# Altium footprint library PTUMotorDriver.PcbLib: 51 footprints (part 1 of 4)
Each footprint in its own frame and in the unit in brackets; x right, y up, seen from the top. Pads: shape width x height; smd on the part's side, far side on the other; paste and mask are expansions set on the pad; w line width, h text height; cw(c..) or ccw(c..) is an arc to the next point about the centre after c.
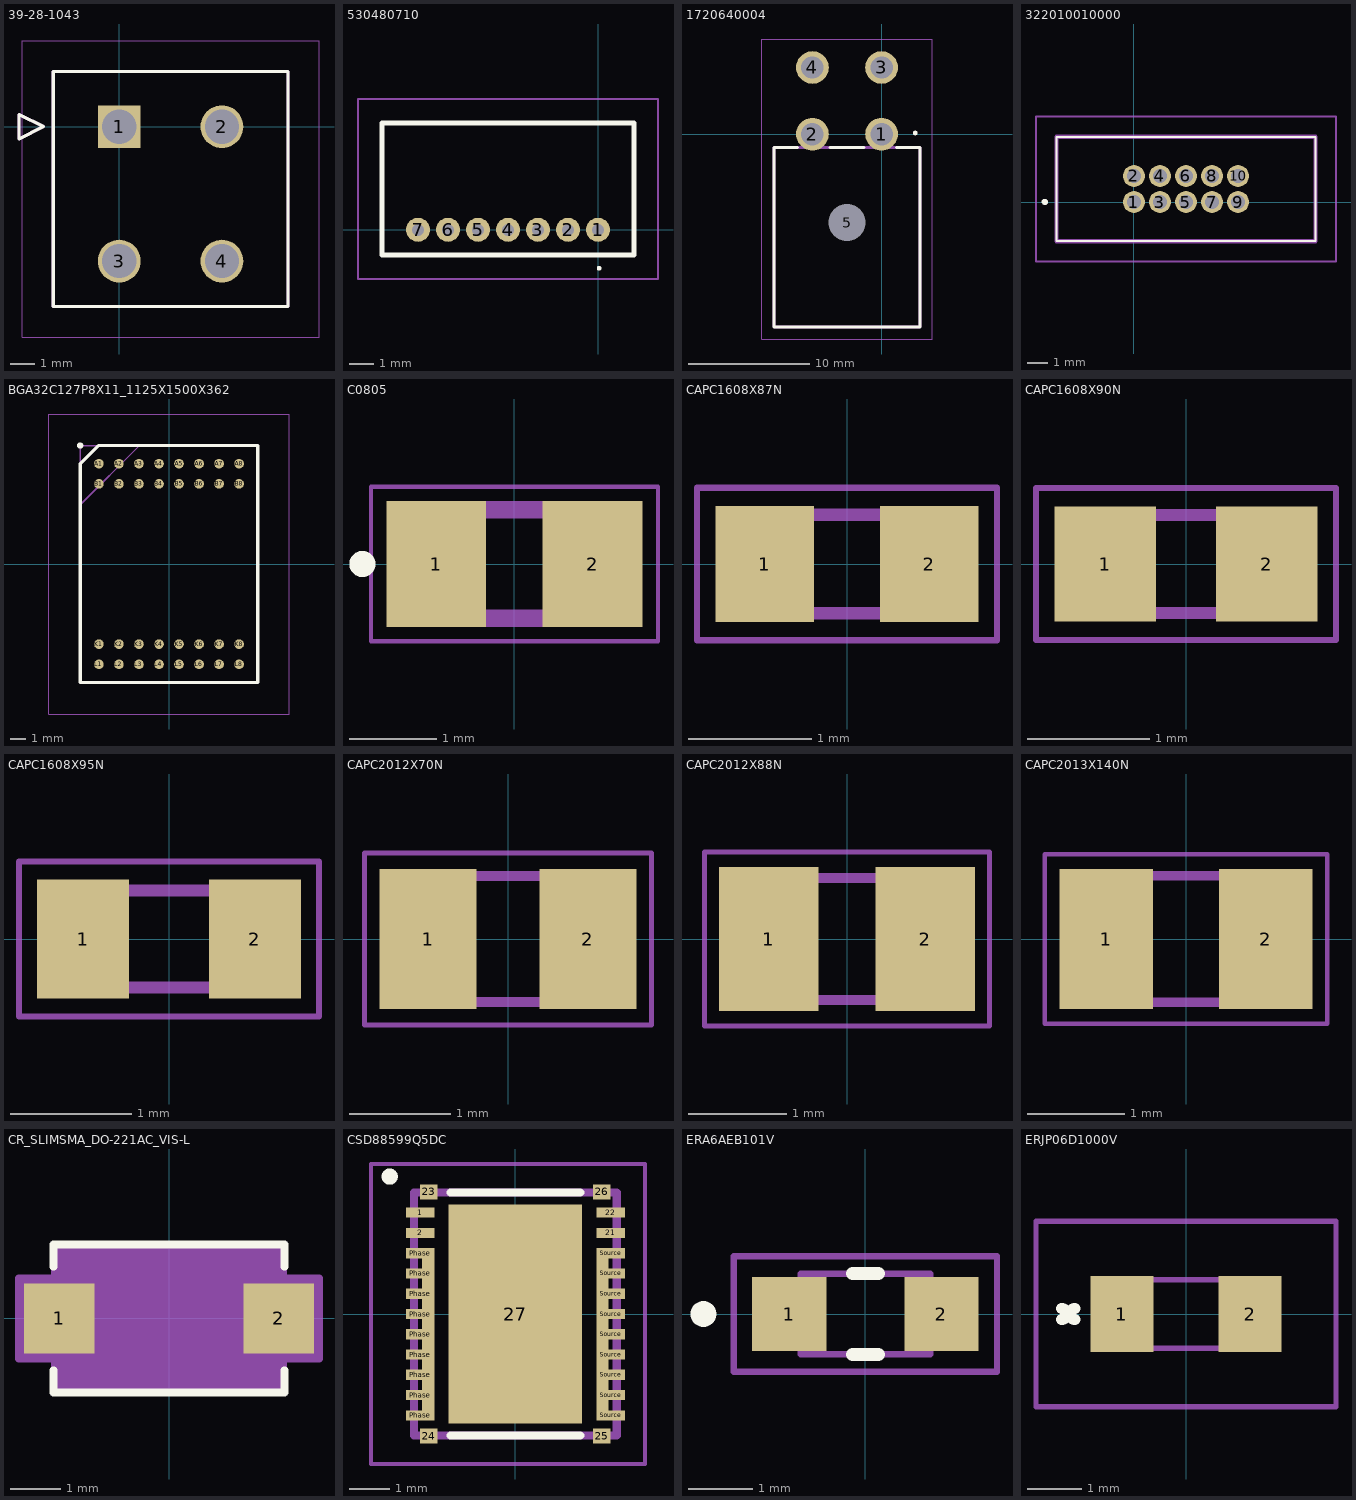
[diagram p0: the footprints below, top view; thin cyan lines are the x and y axes]

## 39-28-1043 [mm]
pads (4):
  rect 1.75x1.75 hole 1.4: 1(0,0)
  round 1.75 hole 1.4: 2(4.2,0) 3(0,-5.5) 4(4.2,-5.5)
Top Overlay:
  lines w0.127: -4.1,-0.5 -4.1,0.5 -3.1,0 -4.1,-0.5 ; -2.7,-7.35 6.9,-7.35 6.9,2.25 -2.7,2.25 -2.7,-7.35
Top 3D Body:
  lines w0.127: -4.1,-0.5 -4.1,0.5 -3.1,0 -4.1,-0.5 ; -2.7,-7.35 6.9,-7.35 6.9,2.25 -2.7,2.25 -2.7,-7.35
Top Courtyard:
  lines w0.05: -3.97,-8.62 8.17,-8.62 8.17,3.52 -3.97,3.52 -3.97,-8.62
3D body "39-28-1043.stp": height 12.76, standoff -3.54, extent -3.107,-8.74 7.29,2.26

## 530480710 [mm]
pads (7):
  round 1 hole 0.5: 1(0,0) 2(-1.25,0) 3(-2.5,0) 4(-3.75,0) 5(-5,0) 6(-6.25,0) 7(-7.5,0)
Top Overlay:
  lines w0.1: 0,-1.6 ccw(c0.05,-1.6) 0.1,-1.6 ccw(c0.05,-1.6) 0,-1.6
  lines w0.2: -9,-1.05 1.5,-1.05 1.5,4.45 -9,4.45 -9,-1.05
Top 3D Body:
  lines w0.1: -9,-1.05 1.5,-1.05 1.5,4.45 -9,4.45 -9,-1.05
Top Courtyard:
  lines w0.1: -10,-2.05 2.5,-2.05 2.5,5.45 -10,5.45 -10,-2.05
3D body "53048-0710.stp": height 3.4, standoff -2.4, extent -9,-1.045 1.5,4.455

## 1720640004 [mm]
pads (5):
  round 2.7 hole 1.85: 1(0,0) 2(-5.7,0) 3(0,5.5) 4(-5.7,5.5)
  round 1.525 hole 3.05 unplated: 5(-2.85,-7.3)
Top Overlay:
  lines w0.188: 2.86,0.042 cw(c2.782,0.095) 2.688,0.095 cw(c2.782,0.095) 2.876,0.095
  lines w0.254: -6.952,-1.1 -8.875,-1.1 -8.875,-15.9 3.175,-15.9 3.175,-1.1 1.252,-1.1 ; -4.25,-1.1 -1.45,-1.1
Top 3D Body:
  lines w0.254: -8.875,-15.9 -8.875,-1.1 3.175,-1.1 3.175,-15.9 -8.875,-15.9
Top Courtyard:
  lines w0.1: -9.875,-16.9 -9.875,7.85 4.175,7.85 4.175,-16.9 -9.875,-16.9
3D body "172064-0004.stp": height 14.5, standoff -3.64, extent -8.884,-15.887 3.176,6.075

## 322010010000 [mm]
pads (10):
  round 1.07 hole 0.7: 1(0,0) 2(0,1.27) 3(1.27,0) 4(1.27,1.27) 5(2.54,0) 6(2.54,1.27) 7(3.81,0) 8(3.81,1.27) 9(5.08,0) 10(5.08,1.27)
Top Overlay:
  lines w0.1: -3.785,-1.915 8.865,-1.915 8.865,3.185 -3.785,3.185 -3.785,-1.915
  lines w0.2: -4.418,0 cw(c-4.368,0) -4.318,0 ; -4.4,0 cw(c-4.35,0) -4.3,0 cw(c-4.35,0) -4.4,0
Top 3D Body:
  lines w0.2: -3.785,-1.915 8.865,-1.915 8.865,3.185 -3.785,3.185 -3.785,-1.915
Top Courtyard:
  lines w0.1: -4.785,-2.915 9.865,-2.915 9.865,4.185 -4.785,4.185 -4.785,-2.915
3D body "3220-10-0100-00.stp": height 5.63, standoff -1.92, extent -3.866,-1.99 8.946,3.254

## BGA32C127P8X11_1125X1500X362 [mm]
pads (32):
  round 0.612 smd: A1(-4.445,6.35) A2(-3.175,6.35) A3(-1.905,6.35) A4(-0.635,6.35) A5(0.635,6.35) A6(1.905,6.35) A7(3.175,6.35) A8(4.445,6.35) B1(-4.445,5.08) B2(-3.175,5.08) B3(-1.905,5.08) B4(-0.635,5.08) B5(0.635,5.08) B6(1.905,5.08) B7(3.175,5.08) B8(4.445,5.08) K1(-4.445,-5.08) K2(-3.175,-5.08) K3(-1.905,-5.08) K4(-0.635,-5.08) K5(0.635,-5.08) K6(1.905,-5.08) K7(3.175,-5.08) K8(4.445,-5.08) L1(-4.445,-6.35) L2(-3.175,-6.35) L3(-1.905,-6.35) L4(-0.635,-6.35) L5(0.635,-6.35) L6(1.905,-6.35) L7(3.175,-6.35) L8(4.445,-6.35)
Top Overlay:
  circle w0.2: c-5.625,7.5 r0.1
  lines w0.2: -5.625,-7.5 -5.625,6.35 -4.475,7.5 5.625,7.5 5.625,-7.5 -5.625,-7.5
Top 3D Body:
  lines w0.1: -5.625,3.75 -1.875,7.5 ; -5.625,-7.5 -5.625,7.5 5.625,7.5 5.625,-7.5 -5.625,-7.5
Top Courtyard:
  lines w0.05: -7.625,-9.5 -7.625,9.5 7.625,9.5 7.625,-9.5 -7.625,-9.5
3D body "LTM2889HY-3#PBF.stp": height 3.62, standoff 0, extent -5.625,-7.5 5.625,7.5

## C0805 [mm]
pads (2):
  rect 1.15x1.45 smd: 1(-0.9,0) 2(0.9,0)
Top Overlay:
  circle w0.2: c-1.75,0 r0.05
Top 3D Body:
  lines w0.2: -1,-0.625 -1,0.625 1,0.625 1,-0.625 -1,-0.625
Top Courtyard:
  lines w0.05: -1.651,-0.889 -1.651,0.889 1.651,0.889 1.651,-0.889 -1.651,-0.889
3D body "C0805C103K5RACTU.stp": height 0.98, standoff 0, extent -1.15,-0.78 1.15,0.77

## CAPC1608X87N [mm]
pads (2):
  rect 0.8x0.94 smd: 1(-0.67,0) 2(0.67,0)
Top 3D Body:
  lines w0.1: -0.8,-0.4 0.8,-0.4 0.8,0.4 -0.8,0.4 -0.8,-0.4
Top Courtyard:
  lines w0.05: -1.22,-0.62 1.22,-0.62 1.22,0.62 -1.22,0.62 -1.22,-0.62
3D body "0603B221K500CT.stp": height 0.87, standoff 0, extent -0.8,-0.4 0.8,0.4

## CAPC1608X90N [mm]
pads (2):
  rect 0.83x0.94 smd: 1(-0.66,0) 2(0.66,0)
Top 3D Body:
  lines w0.1: -0.8,-0.4 0.8,-0.4 0.8,0.4 -0.8,0.4 -0.8,-0.4
Top Courtyard:
  lines w0.05: -1.225,-0.62 1.225,-0.62 1.225,0.62 -1.225,0.62 -1.225,-0.62
3D body "CC0603KRX7R7BB104.stp": height 0.8, standoff 0, extent -0.803,-0.399 0.797,0.401

## CAPC1608X95N [mm]
pads (2):
  rect 0.76x0.98 smd: 1(-0.71,0) 2(0.71,0)
Top 3D Body:
  lines w0.1: -0.8,-0.4 0.8,-0.4 0.8,0.4 -0.8,0.4 -0.8,-0.4
Top Courtyard:
  lines w0.05: -1.24,-0.64 1.24,-0.64 1.24,0.64 -1.24,0.64 -1.24,-0.64
3D body "CL10B475KQ8NQNC.stp": height 0.95, standoff 0, extent -0.8,-0.4 0.8,0.4

## CAPC2012X70N [mm]
pads (2):
  rect 0.96x1.39 smd: 1(-0.79,0) 2(0.79,0)
Top 3D Body:
  lines w0.1: -1,-0.625 1,-0.625 1,0.625 -1,0.625 -1,-0.625
Top Courtyard:
  lines w0.05: -1.42,-0.85 1.42,-0.85 1.42,0.85 -1.42,0.85 -1.42,-0.85
3D body "CC0805BRNPO9BNR47.stp": height 0.7, standoff 0, extent -1,-0.625 1,0.625

## CAPC2012X88N [mm]
pads (2):
  rect 1.02x1.47 smd: 1(-0.8,0) 2(0.8,0)
Top 3D Body:
  lines w0.1: -1,-0.625 -1,0.625 1,0.625 1,-0.625 -1,-0.625
Top Courtyard:
  lines w0.05: -1.46,-0.89 -1.46,0.89 1.46,0.89 1.46,-0.89 -1.46,-0.89
3D body "C0805C102J5GAC-TU.stp": height 0.88, standoff 0, extent -1.1,-0.72 1.1,0.73

## CAPC2013X140N [mm]
pads (2):
  rect 0.96x1.44 smd: 1(-0.82,0) 2(0.82,0)
Top 3D Body:
  lines w0.1: -1.025,-0.65 1.025,-0.65 1.025,0.65 -1.025,0.65 -1.025,-0.65
Top Courtyard:
  lines w0.05: -1.45,-0.87 1.45,-0.87 1.45,0.87 -1.45,0.87 -1.45,-0.87
3D body "LMK212AB7106MG-T.stp": height 1.4, standoff 0, extent -1.025,-0.65 1.025,0.65

## CR_SLIMSMA_DO-221AC_VIS-L [mil]
pads (2):
  rect 55x55 smd paste+0 mask+0: 1(-86,0) 2(86,0)
Top Overlay:
  lines w6: -90.5,-40.6 -90.5,-58 90.5,-58 90.5,-40.6 ; -90.5,40.6 -90.5,58 90.5,58 90.5,40.6
Top 3D Body:
  circle w0: c-58.5,0 r3
  lines w0: -12,53 ccw(c0,53) 12,53
  lines w1: -85.5,-53 85.5,-53 85.5,53 -85.5,53 -85.5,-53
Top Courtyard:
  region: -89.5,-31.5 -117.5,-31.5 -117.5,31.5 -89.5,31.5 -89.5,57 89.5,57 89.5,31.5 117.5,31.5 117.5,-31.5 89.5,-31.5 89.5,-57 -89.5,-57
  lines w6: -117.5,-31.5 -117.5,31.5 -89.5,31.5 -89.5,57 89.5,57 89.5,31.5 117.5,31.5 117.5,-31.5 89.5,-31.5 89.5,-57 -89.5,-57 -89.5,-31.5 -117.5,-31.5
3D body "CR_SLIMSMA_DO-221AC_VIS.step": height 39.09, standoff 0, extent -105.51,-52.99 105.51,52.99

## CSD88599Q5DC [mm]
pads (43):
  rect 0.7x0.25 smd: 1(-2.35,2.5) 2(-2.35,2) 21(2.35,2) 22(2.35,2.5) Phase(-2.35,-2.5) Phase(-2.35,-2) Phase(-2.35,-1.5) Phase(-2.35,-1) Phase(-2.35,-0.5) Phase(-2.35,0) Phase(-2.35,0.5) Phase(-2.35,1) Phase(-2.35,1.5) Source(2.35,-2.5) Source(2.35,-2) Source(2.35,-1.5) Source(2.35,-1) Source(2.35,-0.5) Source(2.35,0) Source(2.35,0.5) Source(2.35,1) Source(2.35,1.5)
  rect 0.43x0.375 smd: 23(-2.135,3.013) 24(-2.135,-3.013) 25(2.135,-3.013) 26(2.135,3.013)
  rect 3.3x5.4 smd: 27(0,0)
  rect 0.3x0.25 smd: Phase(-2.15,-2.25) Phase(-2.15,-1.75) Phase(-2.15,-1.25) Phase(-2.15,-0.75) Phase(-2.15,-0.25) Phase(-2.15,0.25) Phase(-2.15,0.75) Phase(-2.15,1.25) Source(2.15,-2.25) Source(2.15,-1.75) Source(2.15,-1.25) Source(2.15,-0.75) Source(2.15,-0.25) Source(2.15,0.25) Source(2.15,0.75) Source(2.15,1.25)
Top Overlay:
  lines w0.2: -1.6,-3 1.6,-3 ; -1.6,3 1.6,3 ; -3.2,3.389 ccw(c-3.1,3.389) -3,3.389 ccw(c-3.1,3.389) -3.2,3.389
Top 3D Body:
  lines w0.2: -2.5,-3 -2.5,3 2.5,3 2.5,-3 -2.5,-3
Top Courtyard:
  lines w0.1: -3.563,-3.7 -3.563,3.7 3.2,3.7 3.2,-3.7 -3.563,-3.7
3D body "CSD88599Q5DC.stp": height 1.05, standoff 0, extent -2.5,-3 2.5,3

## ERA6AEB101V [mm]
pads (2):
  rect 1.15x1.15 smd: 1(-1.175,0) 2(1.175,0)
Top Overlay:
  lines w0.2: -0.2,-0.625 0.2,-0.625 ; -0.2,0.625 0.2,0.625 ; -2.5,-0.1 ccw(c-2.5,0) -2.5,0.1 ccw(c-2.5,0) -2.5,-0.1
Top 3D Body:
  lines w0.1: -1,-0.625 -1,0.625 1,0.625 1,-0.625 -1,-0.625
Top Courtyard:
  lines w0.1: -2.032,-0.889 -2.032,0.889 2.032,0.889 2.032,-0.889 -2.032,-0.889
3D body "ERA-6AEB7151V.stp": height 0.5, standoff 0, extent -1,-0.625 1,0.625

## ERJP06D1000V [mm]
pads (2):
  rect 1.15x1.4 smd: 1(-1.175,0) 2(1.175,0)
Top Overlay:
  lines w0.2: -2.286,-0.1 ccw(c-2.286,0) -2.286,0.1 ; -2.032,-0.1 cw(c-2.032,0) -2.032,0.1
Top 3D Body:
  lines w0.1: -1,-0.625 -1,0.625 1,0.625 1,-0.625 -1,-0.625
Top Courtyard:
  lines w0.1: -2.75,-1.7 -2.75,1.7 2.75,1.7 2.75,-1.7 -2.75,-1.7
3D body "ERJ-P06F2802V.stp": height 0.6, standoff 0, extent -1,-0.625 1,0.625